# Altium schematic symbol library lt3045hdd.SchLib: 1 symbol
Pins are listed as number, name and electrical type; pins without a type are passive.

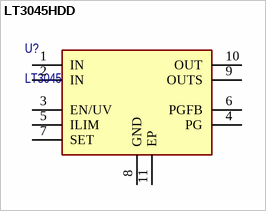
[diagram p0: symbol LT3045HDD]

## LT3045HDD
designator U?, comment LT3045
20V, 500mA, Ultralow Noise, Ultrahigh PSRR Linear Regulator; Manufacturer: Analog Devices; Manufacturer Lifecycle Status: PRODUCTION; Manufacturer Part Number: LT3045HDD#TRPBF; Case/Package: DFN; Category: LDO Voltage Regulators; Lifecycle Status: Production; Pins: 10; RoHS: Compliant
footprint LT3045HDD
pins: 1 IN, 2 IN, 3 EN/UV, 4 PG, 5 ILIM, 6 PGFB, 7 SET, 8 GND, 9 OUTS, 10 OUT, 11 EP